# Altium footprint library DIPS508W60P254L640H800Q4N.PcbLib: 1 footprints
Each footprint in its own frame and in the unit in brackets; x right, y up, seen from the top. Pads: shape width x height; smd on the part's side, far side on the other; paste and mask are expansions set on the pad; w line width, h text height; cw(c..) or ccw(c..) is an arc to the next point about the centre after c.
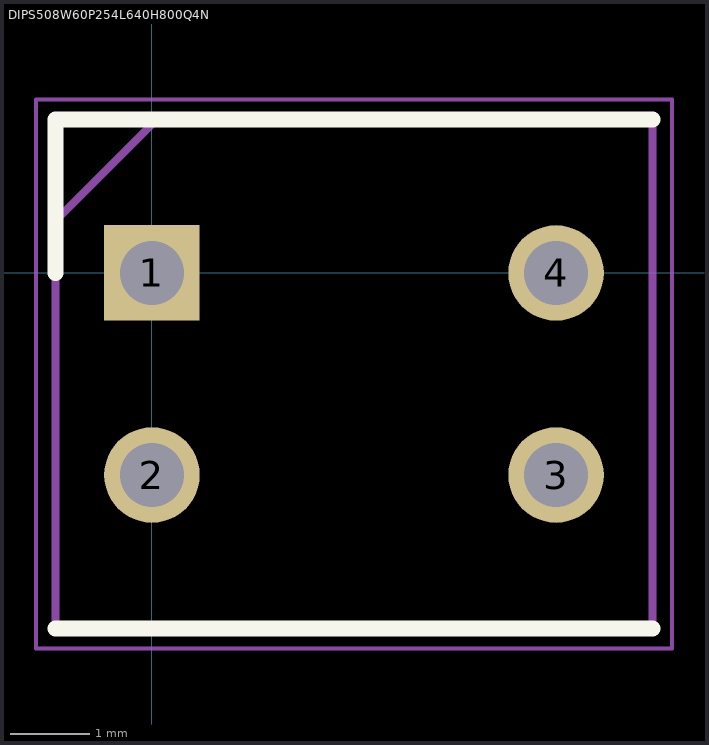
[diagram p0: the footprint, top view; thin cyan lines are the x and y axes]

## DIPS508W60P254L640H800Q4N [mm]
pads (4):
  rect 1.2x1.2 / inner round 1.2 / far side rect 1.2x1.2 hole 0.8: 1(0,0)
  round 1.2 hole 0.8: 2(0,-2.54) 3(5.08,-2.54) 4(5.08,0)
Top Overlay:
  lines w0.2: -1.21,-4.47 6.29,-4.47 ; -1.21,0 -1.21,1.93 6.29,1.93
Mechanical 15:
  lines w0.1: -1.21,0.66 0.06,1.93 ; -1.21,-4.47 6.29,-4.47 6.29,1.93 -1.21,1.93 -1.21,-4.47
Mechanical 20:
  lines w0.05: -1.46,-4.72 6.54,-4.72 6.54,2.18 -1.46,2.18 -1.46,-4.72